# Altium footprint library CONN_SD-43650-001_02_MOL.PcbLib: 1 footprints
Each footprint in its own frame and in the unit in brackets; x right, y up, seen from the top. Pads: shape width x height; smd on the part's side, far side on the other; paste and mask are expansions set on the pad; w line width, h text height; cw(c..) or ccw(c..) is an arc to the next point about the centre after c.
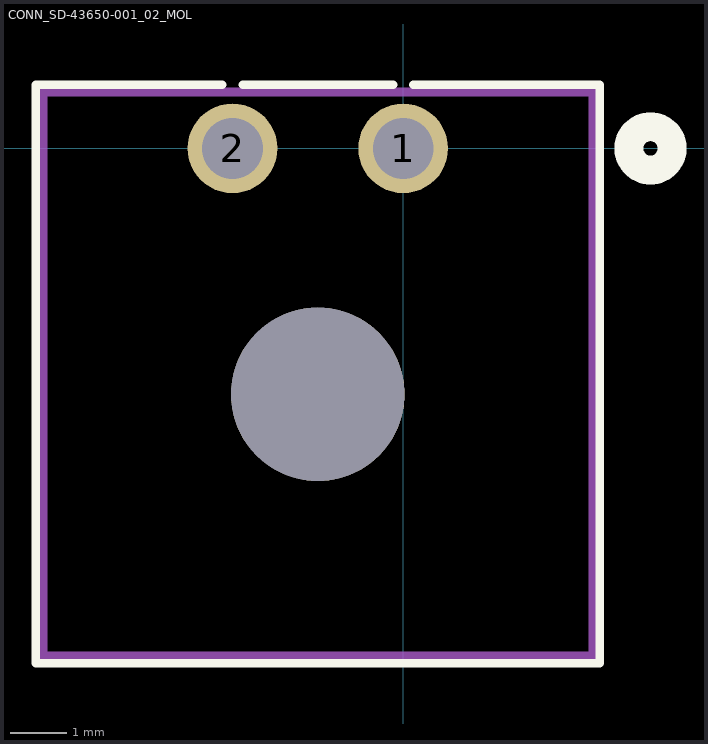
[diagram p0: the footprint, top view; thin cyan lines are the x and y axes]

## CONN_SD-43650-001_02_MOL [mil]
pads (3):
  round 62 hole 42 mask+4.02: 1(0,0) 2(-118,0)
  round 120 hole 120 unplated mask+0: ""(-59,-170)
Top Overlay:
  lines w6: -125,44 -254,44 -254,-356 136,-356 136,44 7,44 ; -111,44 -7,44
  lines w20: 156,0 ccw(c171,0) 186,0 ccw(c171,0) 156,0
Bottom Overlay:
  lines w20: 156,0 ccw(c171,0) 186,0 ccw(c171,0) 156,0
Assembly Top:
  lines w6: -249,-351 131,-351 131,39 -249,39 -249,-351
  lines w20: -15,0 ccw(c0,0) 15,0 ccw(c0,0) -15,0